# Altium footprint library aksima_footprint.PcbLib: 77 footprints (part 2 of 5)
Each footprint in its own frame and in the unit in brackets; x right, y up, seen from the top. Pads: shape width x height; smd on the part's side, far side on the other; paste and mask are expansions set on the pad; w line width, h text height; cw(c..) or ccw(c..) is an arc to the next point about the centre after c.
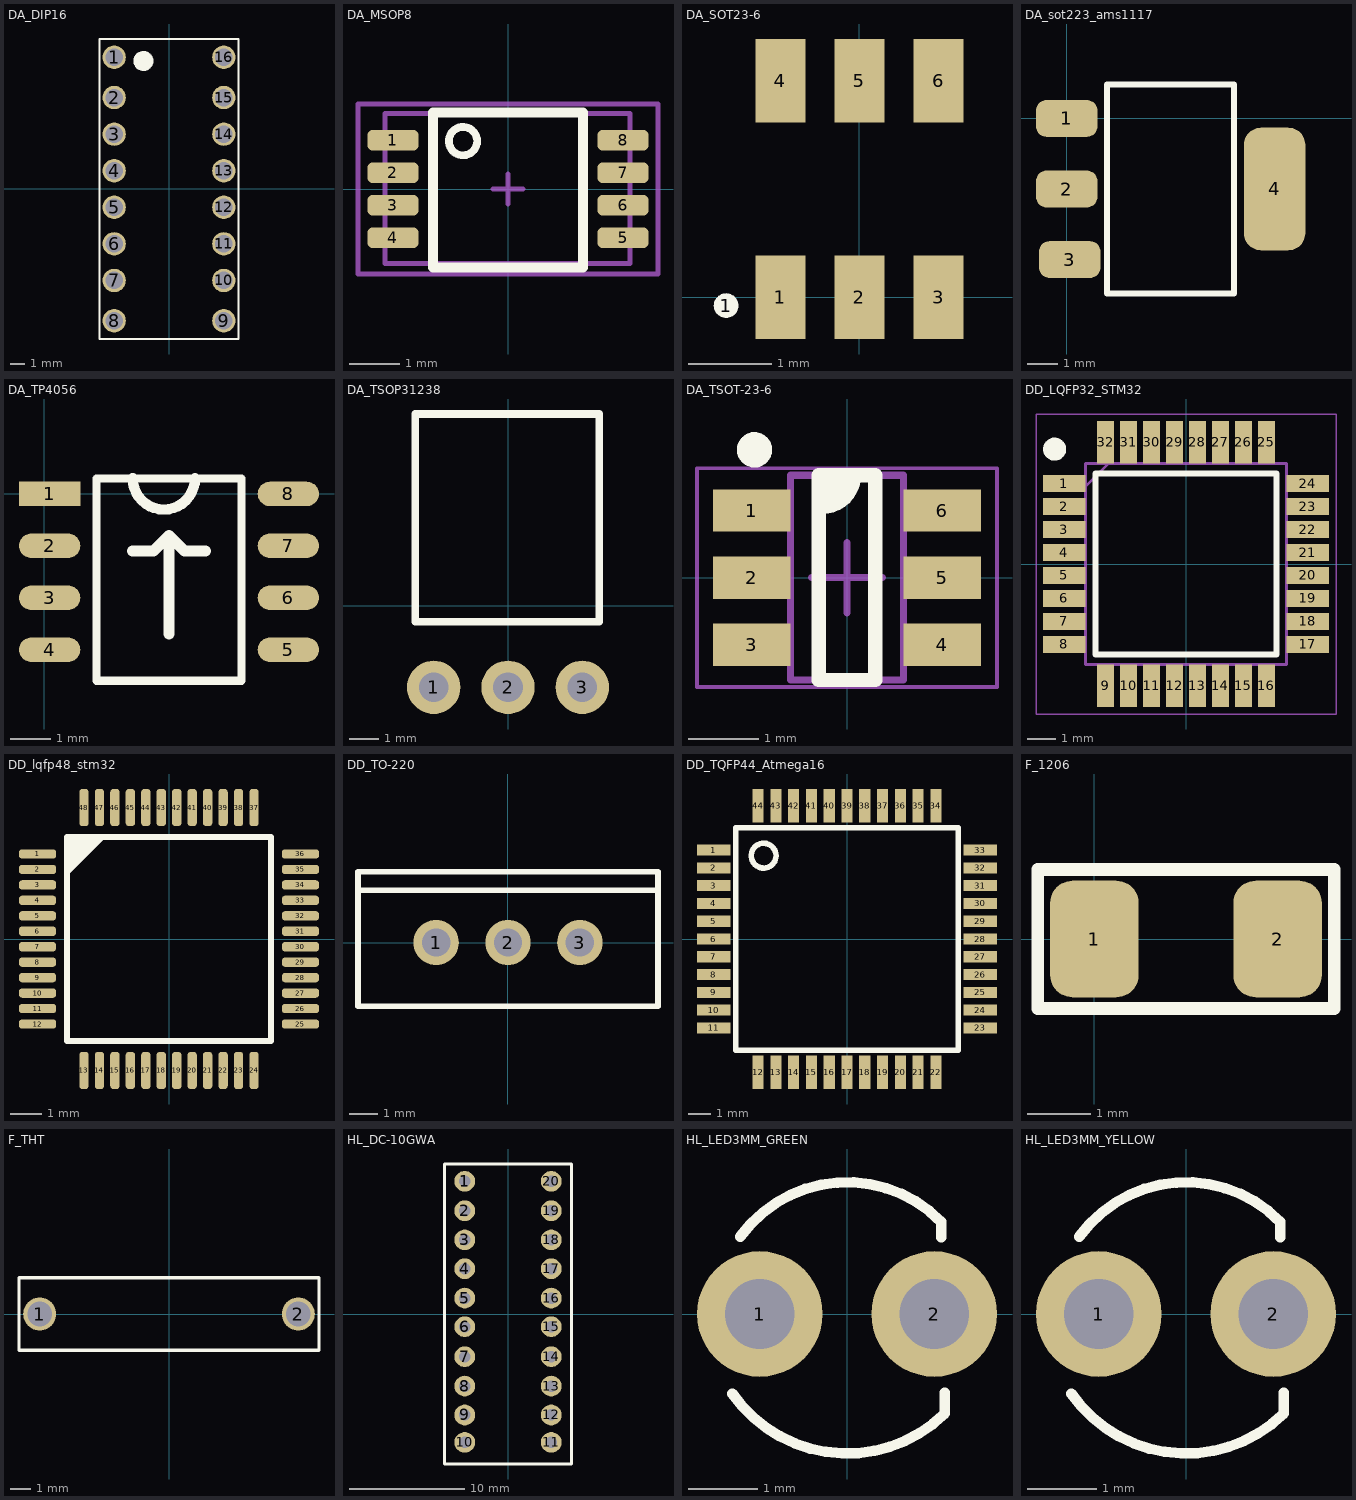
[diagram p1: the footprints below, top view; thin cyan lines are the x and y axes]

## DA_DIP16 [mm] "Integrated circuit footprint, DIP16"
pads (16):
  round 1.6 hole 1.2 unplated: 1(-3.75,9) 2(-3.75,6.25) 3(-3.75,3.75) 4(-3.75,1.25) 5(-3.75,-1.25) 6(-3.75,-3.75) 7(-3.75,-6.25) 8(-3.75,-9) 9(3.75,-9) 10(3.75,-6.25) 11(3.75,-3.75) 12(3.75,-1.25) 13(3.75,1.25) 14(3.75,3.75) 15(3.75,6.25) 16(3.75,9)
Top Overlay:
  circle w0.254: c-1.75,8.75 r0.559
  rectangle: -2.25,8.25 -1.25,9.25
  lines w0.15: -4.75,-10.25 -4.75,10.25 4.75,10.25 4.75,-10.25 -4.75,-10.25
3D body "DIP16.STEP": height 4.7, standoff -2.6, extent -3.935,-9.98 3.935,9.98

## DA_MSOP8 [mm] "Integrated circuit footprint, MSOP8"
pads (8):
  rrect50% 1.02x0.41 smd: 1(-2.3,0.975) 2(-2.3,0.325) 3(-2.3,-0.325) 4(-2.3,-0.975) 5(2.3,-0.975) 6(2.3,-0.325) 7(2.3,0.325) 8(2.3,0.975)
Top Overlay:
  circle w0.154: c-0.9,0.958 r0.283
  lines w0.2: -1.5,-1.565 1.5,-1.565 1.5,1.535 -1.5,1.535 -1.5,-1.565
Mechanical 1:
  text ".Designator" at -1.1,-0.5 h1
Mechanical 13:
  lines w0.102: -2.464,-1.49 2.436,-1.49 2.436,1.51 -2.464,1.51 -2.464,-1.49
Mechanical 15:
  lines w0.102: -0.3,0 0.3,0 ; 0,-0.3 0,0.3 ; -3,-1.7 3,-1.7 3,1.7 -3,1.7 -3,-1.7
3D body "MSOP-8.step": height 1.15, standoff 0, extent -2.464,-1.49 2.436,1.51

## DA_SOT23-6 [mm] "SOT143-4 per SP0503BAHTG (WRONG PIN ORDER)"
pads (7):
  round 0.3 on Top Overlay: 1(-1.6,-0.1)
  rect 0.6x1 smd: 1(-0.95,0) 2(0,0) 3(0.95,0) 4(-0.95,2.6) 5(0,2.6) 6(0.95,2.6)
3D body "SOT236.step": height 1, standoff 0, extent -1.46,0.13 1.46,2.47

## DA_sot223_ams1117 [mm] "Integrated circuit footprint, sot223 ams1117"
pads (4):
  rrect55% 2x1.2 smd: 1(0,0) 2(0,-2.3) 3(0.1,-4.6)
  rrect55% 2x4 smd: 4(6.775,-2.3)
Top Overlay:
  lines w0.2: 1.317,-5.7 1.317,1.1 5.45,1.1 5.45,-5.7 1.317,-5.7
  text "." at -0.6,1.054 h4.5
3D body "AMS1117 Sot 223.step": height 1.8, standoff -0.22, extent -0.45,-5.579 6.923,0.921

## DA_TP4056 [mm] "Integrated circuit footprint, TP4056"
pads (8):
  rect 1.5x0.6 smd: 1(0.127,0)
  oval 1.5x0.6 smd: 2(0.127,-1.27) 3(0.127,-2.54) 4(0.127,-3.81) 5(5.969,-3.81) 6(5.969,-2.54) 7(5.969,-1.27) 8(5.969,0)
Top Overlay:
  lines w0.2: 1.273,-4.572 4.826,-4.572 4.826,0.381 1.273,0.381 1.273,-4.572
  lines w0.254: 2.159,0.381 ccw(c2.921,0.381) 2.921,-0.381 ccw(c2.921,0.381) 3.683,0.381
  lines w0.278: 2.159,-1.397 2.667,-1.397 3.048,-1.016 ; 3.048,-3.429 3.048,-1.016 ; 3.937,-1.397 3.429,-1.397 3.048,-1.016
Mechanical 15:
  lines w0.1: 3.027,-2.069 3.027,-1.069
3D body "ESOP-8.step": height 1.82, standoff 0, extent -0.052,-4.405 6.148,0.595

## DA_TSOP31238 [mm] "Through-hole infrared receiver, TSOP31238 library footprint"
pads (3):
  round 1.8 hole 1: 1(-2.5,-2.75) 2(0,-2.75) 3(2.5,-2.75)
Top Overlay:
  lines w0.254: -3.125,-0.55 3.075,-0.55 3.075,6.45 -3.125,6.45 -3.125,-0.55
3D body "IR receiver_1.stp": height 4.88, standoff -2.49, extent -2.8,-3.04 2.78,5.84

## DA_TSOT-23-6 [mm] "TSOT23, 6-Leads, Body 2.90x2.80mm, Pitch 0.95mm, IPC High Density"
height 1.1
pads (6):
  rrect1% 1.1x0.6 smd: 1(-1.35,0.95) 2(-1.35,0) 3(-1.35,-0.95) 4(1.35,-0.95) 5(1.35,0) 6(1.35,0.95)
Top Overlay:
  circle w0.25: c-1.31,1.81 r0.125
  region: -0.4,1.45 0.1,1.45 0.1,1.3 -0.2,1 -0.4,1
  lines w0.2: -0.4,1 -0.35,1 ccw(c-0.35,1.45) 0.1,1.45 ; -0.4,-1.45 0.4,-1.45 0.4,1.45 -0.4,1.45 -0.4,-1.45
Mechanical 13:
  lines w0.1: -0.8,-1.45 0.8,-1.45 0.8,1.45 -0.8,1.45 -0.8,-1.45
Mechanical 15:
  lines w0.05: -2.125,-1.55 -2.125,1.55 2.125,1.55 2.125,-1.55 -2.125,-1.55
  lines w0.1: -0.5,0 0.5,0 ; 0,-0.5 0,0.5
3D body "TI - TSOT-23-6 v2.step": height 1.1, standoff 0, extent -1.4,-1.45 1.4,1.45

## DD_LQFP32_STM32 [mm] "Semiconductor device footprint, LQFP32 STM32"
pads (32):
  rect 1.475x0.6 smd: 1(-4.238,2.8) 2(-4.238,2) 3(-4.238,1.2) 4(-4.238,0.4) 5(-4.238,-0.4) 6(-4.238,-1.2) 7(-4.238,-2) 8(-4.238,-2.8) 17(4.238,-2.8) 18(4.238,-2) 19(4.238,-1.2) 20(4.238,-0.4) 21(4.238,0.4) 22(4.238,1.2) 23(4.238,2) 24(4.238,2.8)
  rect 0.6x1.475 smd: 9(-2.8,-4.238) 10(-2,-4.238) 11(-1.2,-4.238) 12(-0.4,-4.238) 13(0.4,-4.238) 14(1.2,-4.238) 15(2,-4.238) 16(2.8,-4.238) 25(2.8,4.238) 26(2,4.238) 27(1.2,4.238) 28(0.4,4.238) 29(-0.4,4.238) 30(-1.2,4.238) 31(-2,4.238) 32(-2.8,4.238)
Top Overlay:
  circle w0.4: c-4.575,4 r0.2
  lines w0.2: -3.15,-3.15 -3.15,3.15 3.15,3.15 3.15,-3.15 -3.15,-3.15
Mechanical 15:
  lines w0.1: -3.5,2.7 -2.7,3.5 ; -3.5,-3.5 -3.5,3.5 3.5,3.5 3.5,-3.5 -3.5,-3.5
Mechanical 20:
  lines w0.05: -5.225,-5.225 -5.225,5.225 5.225,5.225 5.225,-5.225 -5.225,-5.225
3D body "STM32_LQFP32.stp": height 1.4, standoff -0.1, extent -4.518,-4.484 4.5,4.284

## DD_lqfp48_stm32 [mm] "Semiconductor device footprint, lqfp48 stm32"
pads (48):
  rrect65% 1.2x0.3 smd: 1(-4.25,2.75) 2(-4.25,2.25) 3(-4.25,1.75) 4(-4.25,1.25) 5(-4.25,0.75) 6(-4.25,0.25) 7(-4.25,-0.25) 8(-4.25,-0.75) 9(-4.25,-1.25) 10(-4.25,-1.75) 11(-4.25,-2.25) 12(-4.25,-2.75) 25(4.25,-2.75) 26(4.25,-2.25) 27(4.25,-1.75) 28(4.25,-1.25) 29(4.25,-0.75) 30(4.25,-0.25) 31(4.25,0.25) 32(4.25,0.75) 33(4.25,1.25) 34(4.25,1.75) 35(4.25,2.25) 36(4.25,2.75)
  rrect65% 0.3x1.2 smd: 13(-2.75,-4.25) 14(-2.25,-4.25) 15(-1.75,-4.25) 16(-1.25,-4.25) 17(-0.75,-4.25) 18(-0.25,-4.25) 19(0.25,-4.25) 20(0.75,-4.25) 21(1.25,-4.25) 22(1.75,-4.25) 23(2.25,-4.25) 24(2.75,-4.25) 37(2.75,4.25) 38(2.25,4.25) 39(1.75,4.25) 40(1.25,4.25) 41(0.75,4.25) 42(0.25,4.25) 43(-0.25,4.25) 44(-0.75,4.25) 45(-1.25,4.25) 46(-1.75,4.25) 47(-2.25,4.25) 48(-2.75,4.25)
Top Overlay:
  region: -3.25,3.25 -2.084,3.25 -3.25,2.084
  lines w0.2: -3.3,-3.3 -3.3,3.3 3.3,3.3 3.3,-3.3 -3.3,-3.3
  text "." at -4.572,3.356 h4.5
3D body "LQFP-48.STEP": height 1.59, standoff -0.01, extent -4.5,-4.5 4.5,4.5

## DD_TO-220 [mm] "TO, Thru-Hole, Vertical, Heatsink Mounted; 3 In-Line Leads; Pitch 2.54 mm"
height 21.4
pads (3):
  round 1.6 hole 1: 1(-2.54,0) 2(0,0) 3(2.54,0)
Top Overlay:
  lines w0.2: -5.3,1.85 5.3,1.85 ; -5.3,-2.25 -5.3,2.5 5.3,2.5 5.3,-2.25 -5.3,-2.25
Mechanical 1:
  lines w0.1: -0.5,2.5 5.25,2.5 ; 5.25,2.5 -5.25,2.5 -5.25,-2.25 5.25,-2.25 5.25,2.5
3D body "User Library-TO-220-1.STEP": height 19.8, standoff -8.98, extent -4.95,-2.1 4.95,2.4

## DD_TQFP44_Atmega16 [mm] "ATmega16 microcontroller, TQFP-44"
pads (44):
  rect 1.5x0.5 smd: 1(-6,4) 2(-6,3.2) 3(-6,2.4) 4(-6,1.6) 5(-6,0.8) 6(-6,0) 7(-6,-0.8) 8(-6,-1.6) 9(-6,-2.4) 10(-6,-3.2) 11(-6,-4) 23(6,-4) 24(6,-3.2) 25(6,-2.4) 26(6,-1.6) 27(6,-0.8) 28(6,0) 29(6,0.8) 30(6,1.6) 31(6,2.4) 32(6,3.2) 33(6,4)
  rect 0.5x1.5 smd: 12(-4,-6) 13(-3.2,-6) 14(-2.4,-6) 15(-1.6,-6) 16(-0.8,-6) 17(0,-6) 18(0.8,-6) 19(1.6,-6) 20(2.4,-6) 21(3.2,-6) 22(4,-6) 34(4,6) 35(3.2,6) 36(2.4,6) 37(1.6,6) 38(0.8,6) 39(0,6) 40(-0.8,6) 41(-1.6,6) 42(-2.4,6) 43(-3.2,6) 44(-4,6)
Top Overlay:
  circle w0.254: c-3.75,3.75 r0.559
  lines w0.254: -5,-5 -5,5 5,5 5,-5 -5,-5
3D body "tqfp-44.stp": height 1.61, standoff 0.01, extent -6.012,-6.012 6.012,6.012

## F_1206 [mm] "Fuse footprint, 1206"
pads (2):
  rrect50% 1.4x1.85 smd: 1(0,0) 2(2.9,0)
Top Overlay:
  lines w0.2: -0.9,-1.1 3.8,-1.1 3.8,1.1 -0.9,1.1 -0.9,-1.1
3D body "Fuse_1206_3216Metric.step": height 0.5, standoff 0, extent -0.35,-0.92 3.15,0.92

## F_THT [mm] "Fuse footprint, THT"
pads (2):
  round 1.6 hole 1.2: 1(-6.25,0) 2(6.25,0)
Top Overlay:
  lines w0.15: -7.25,-1.75 -7.25,0 -7.25,1.75 7,1.75 7.25,1.75 7.25,-1.75 -7.25,-1.75
3D body "4-4.STEP": height 2.49, standoff -3, extent -6.55,-1.5 6.55,1.5

## HL_DC-10GWA [mm] "LED bar-graph display, DC-10GWA"
pads (20):
  round 1.8 hole 1: 1(-3.75,11.5) 2(-3.75,8.95) 3(-3.75,6.425) 4(-3.75,3.925) 5(-3.75,1.375) 6(-3.75,-1.1) 7(-3.75,-3.7) 8(-3.75,-6.25) 9(-3.75,-8.75) 10(-3.75,-11.125) 11(3.75,-11.125) 12(3.75,-8.75) 13(3.75,-6.25) 14(3.75,-3.7) 15(3.75,-1.1) 16(3.75,1.375) 17(3.75,3.925) 18(3.75,6.425) 19(3.75,8.95) 20(3.75,11.5)
Top Overlay:
  lines w0.254: -5.5,-13 5.5,-13 5.5,13 -5.5,13 -5.5,-13
3D body "LED bar.STEP": height 8, standoff -4.2, extent -5.08,-12.7 5.08,12.7

## HL_LED3MM_GREEN [mm] "Green LED, 3 mm body"
pads (2):
  round 1.8 hole 1: 1(-1.25,0) 2(1.25,0)
Top Overlay:
  lines w0.15: -1.643,-1.14 ccw(c0,0) 1.403,-1.426 1.403,-1.128 ; -1.529,1.11 cw(c0,0) 1.351,1.321 1.351,1.099
3D body "OscarML_Led 3mm Verde.step": height 6.19, standoff -25.51, extent -1.865,-2.029 1.681,1.868

## HL_LED3MM_YELLOW [mm] "Yellow LED, 3 mm body"
pads (2):
  round 1.8 hole 1: 1(-1.25,0) 2(1.25,0)
Top Overlay:
  lines w0.15: -1.643,-1.14 ccw(c0,0) 1.403,-1.426 1.403,-1.128 ; -1.529,1.11 cw(c0,0) 1.351,1.321 1.351,1.099
3D body "DiegoJG_Led 3mm Amarillo.step": height 6.3, standoff -17, extent -1.95,-1.75 1.5,2.15